# Altium schematic symbol library UCP.SchLib: 378 symbols (part 10 of 14)
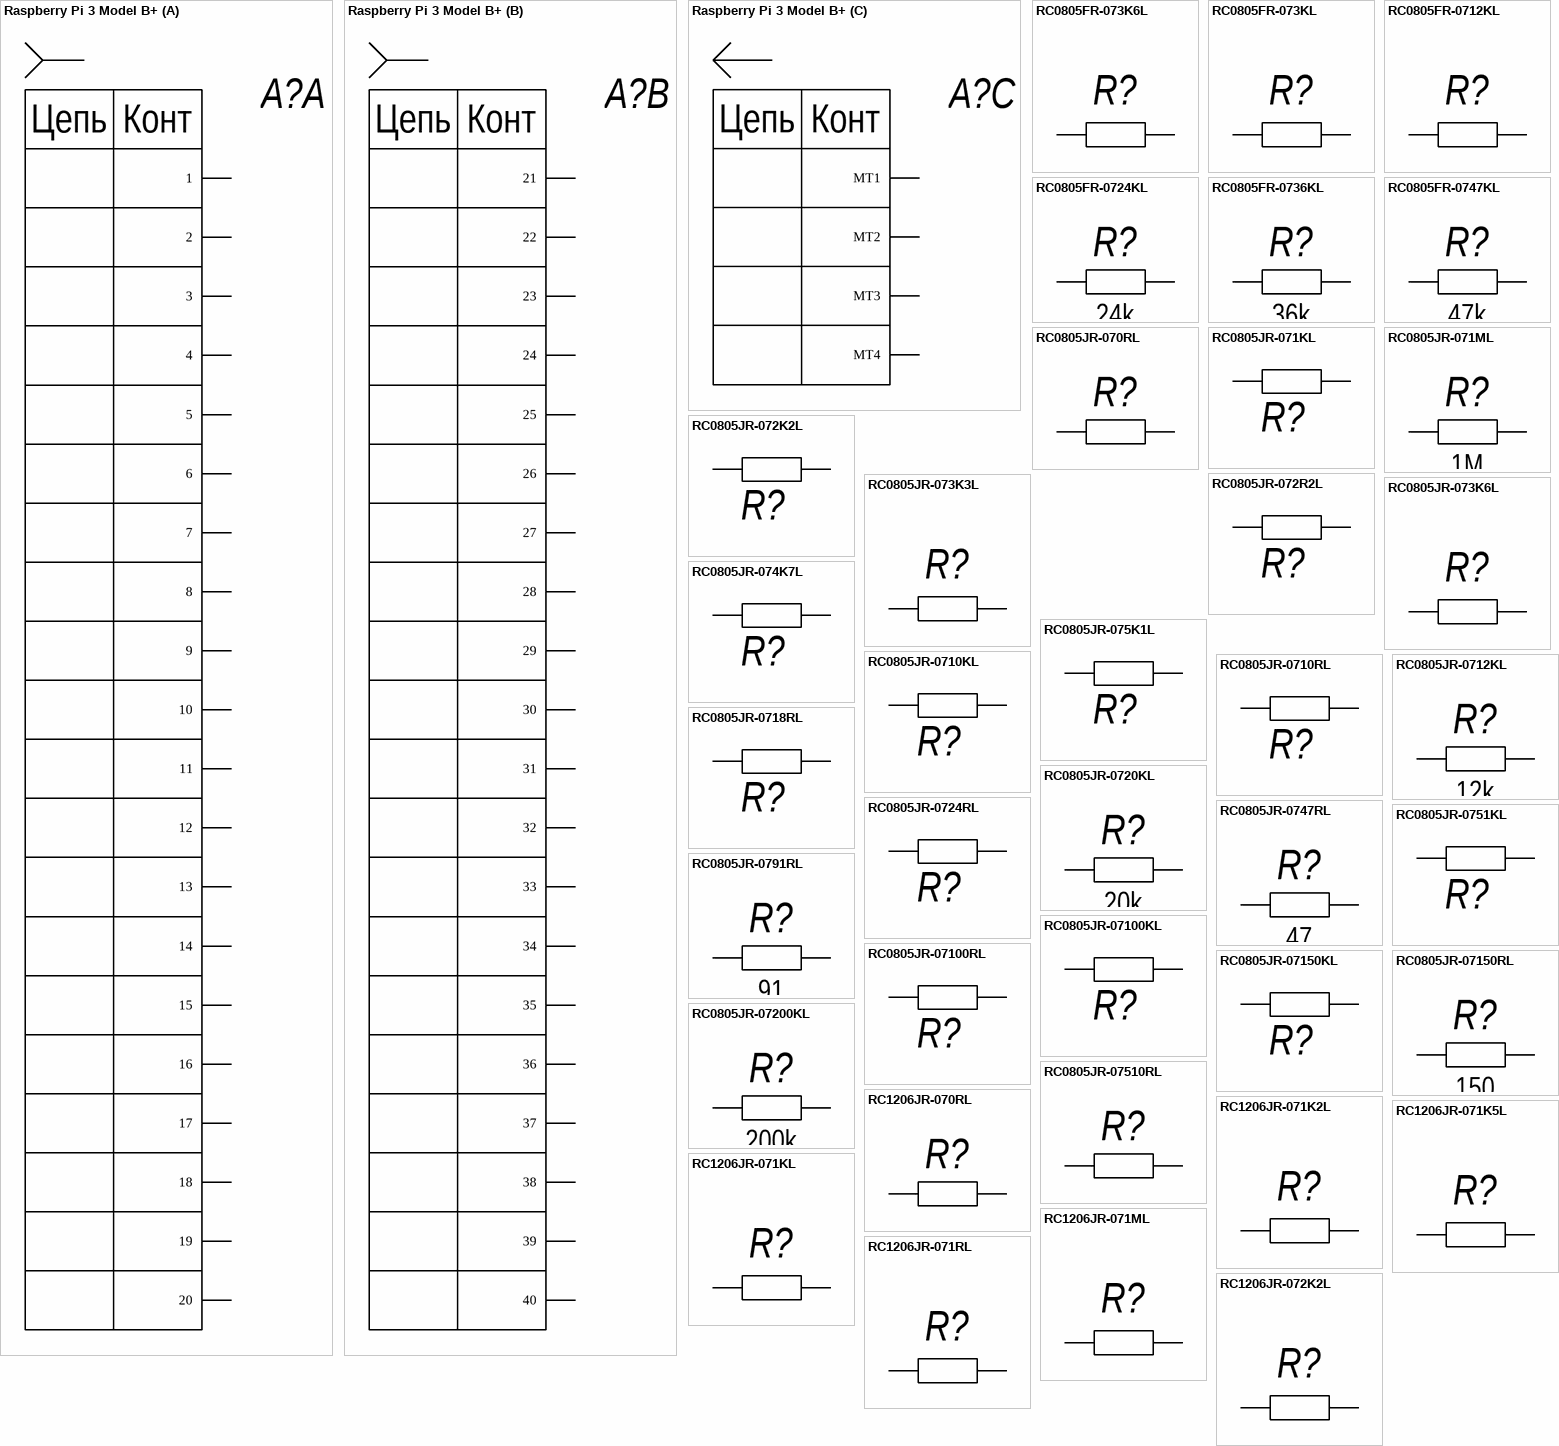
[diagram p33: symbols Raspberry Pi 3 Model B+ to RC1206JR-072K2L]

## RC1206JR-071K5L
designator R?  (value not drawn)
Chip Resistor Surface Mount 1206 1,5 кОм; Manufacturer 1: Yageo; Power Rating: 250mW; Tolerance: 5%; Resistance: 1.5kR; Voltage Rating: 200V; Temperature Coefficient: 100ppm/°C; Value: 1k5; Supplier 1: Digi-Key; Supplier Part Number 1: 311-1.5KERCT-ND; Manufacturer Part Number 1: RC1206JR-071K5L; RoHS: Yes; Category: Chip SMD Resistors; Stock 1: 19121; Pricing 1: 1=0,10000, 10=0,06300, 100=0,02580, 1000=0,01158, 2500=0,01005 (USD); Case/Package: 1206; Case Code (Imperial): 1206; Case Code (Metric): 3216; Size Code: 1206; Min Operating Temperature: -55°C; Max Operating Temperature: 155°C; Resistor Type: Thick Film; Packaging: Tape and Reel; Package Quantity: 1; Termination: SMD/SMT; Number of Terminations: 2; Max Power Dissipation: 250mW; Features: Moisture Resistant; Series: RC; Construction: Rectangular; Resistance Tolerance: 5%; Length: 3.1mm; Width: 1.6mm; Height: 0.026inch; Depth: 1.6mm; REACH SVHC: No SVHC; Military Standard: Not; Lead Free: Lead Free; RoHS Compliant: Yes; ComponentLink1URL: https://datasheet.ciiva.com/29181/402567-da-01-en-smd-widerstand-chip1206-1-5-kohm-29181470.pdf?src-supplier=Conrad; ComponentLink1Description: https://datasheet.ciiva.com/29181/402567-da-01-en-smd-widerstand-chip1206-1-5-kohm-29181470.pdf?src-supplier=Conrad; ComponentLink2URL: https://datasheet.ciiva.com/2458/pyu-r-int-thick-7-2458683.pdf?src-supplier=Digi-Key; ComponentLink2Description: https://datasheet.ciiva.com/2458/pyu-r-int-thick-7-2458683.pdf?src-supplier=Digi-Key; ComponentLink3URL: https://datasheet.ciiva.com/2458/pyu-r-int-thick-7-2458685.pdf?src-supplier=Digi-Key; ComponentLink3Description: https://datasheet.ciiva.com/2458/pyu-r-int-thick-7-2458685.pdf?src-supplier=Digi-Key; ComponentLink4URL: https://datasheet.ciiva.com/7857/444357-7857455.pdf?src-supplier=Element14; ComponentLink4Description: https://datasheet.ciiva.com/7857/444357-7857455.pdf?src-supplier=Element14; ComponentLink5URL: https://datasheet.ciiva.com/2458/pyu-r-int-thick-7-2458684.pdf?src-supplier=Digi-Key; ComponentLink5Description: https://datasheet.ciiva.com/2458/pyu-r-int-thick-7-2458684.pdf?src-supplier=Digi-Key; Mount: SMT; Type: Резистор
footprint RESC310X160X65L40N (Resistor, Chip; 3.10 mm L X 1.60 mm W X 0.65 mm H body)
pins: 1, 2

## RC1206JR-071KL
designator R?  (value not drawn)
Chip Resistor Surface Mount 1206 1 кОм; Manufacturer 1: Yageo; Resistance: 1kR; Power Rating: 250mW; Tolerance: 5%; Voltage Rating: 200V; Temperature Coefficient: 100ppm/°C; Value: 1k; Supplier 1: Digi-Key; Supplier Part Number 1: 311-1.0KERCT-ND; Manufacturer Part Number 1: RC1206JR-071KL; RoHS: Yes; Category: Chip SMD Resistors; Stock 1: 240419; Pricing 1: 1=0,10000, 10=0,06300, 100=0,02580, 1000=0,01158, 2500=0,01005 (USD); Case/Package: 1206; Case Code (Metric): 3216; Case Code (Imperial): 1206; Size Code: 1206; Min Operating Temperature: -55°C; Max Operating Temperature: 155°C; Package Quantity: 1; Packaging: Tape and Reel; Resistor Type: Thick Film; Number of Terminations: 2; Termination: SMD/SMT; Max Power Dissipation: 250mW; Series: RC1206; Resistance Tolerance: 5%; Construction: Rectangular; Length: 3.1mm; Width: 0.063inch; Height: 0.026inch; Depth: 1.6mm; REACH SVHC: Unknown; Military Standard: Not; Lead Free: Lead Free; RoHS Compliant: Yes; ComponentLink1URL: https://datasheet.ciiva.com/2458/pyu-r-int-thick-7-2458673.pdf?src-supplier=Digi-Key; ComponentLink1Description: https://datasheet.ciiva.com/2458/pyu-r-int-thick-7-2458673.pdf?src-supplier=Digi-Key; ComponentLink2URL: https://datasheet.ciiva.com/2458/pyu-r-int-thick-7-2458672.pdf?src-supplier=Digi-Key; ComponentLink2Description: https://datasheet.ciiva.com/2458/pyu-r-int-thick-7-2458672.pdf?src-supplier=Digi-Key; ComponentLink3URL: https://datasheet.ciiva.com/2458/pyu-r-int-thick-7-2458671.pdf?src-supplier=Digi-Key; ComponentLink3Description: https://datasheet.ciiva.com/2458/pyu-r-int-thick-7-2458671.pdf?src-supplier=Digi-Key; Mount: SMT; Type: Резистор
footprint RESC310X160X65L40N (Resistor, Chip; 3.10 mm L X 1.60 mm W X 0.65 mm H body)
pins: 1, 2

## RC1206JR-071ML
designator R?  (value not drawn)
Chip Resistor Surface Mount 1206 1 МОм; Manufacturer 1: Yageo; Tolerance: 5%; Resistance: 1MR; Power Rating: 250mW; Voltage Rating: 200V; Temperature Coefficient: 100ppm/°C; Value: 1M; Supplier 1: Digi-Key; Supplier Part Number 1: 311-1.0MERCT-ND; Manufacturer Part Number 1: RC1206JR-071ML; RoHS: Yes; Category: Chip SMD Resistors; Stock 1: 39096; Pricing 1: 1=0,10000, 10=0,06300, 100=0,02580, 1000=0,01158, 2500=0,01005 (USD); Case/Package: 1206; Case Code (Imperial): 1206; Case Code (Metric): 3216; Size Code: 1206; Min Operating Temperature: -55°C; Max Operating Temperature: 155°C; Packaging: Tape and Reel; Resistor Type: Thick Film; Termination: SMD/SMT; Features: Moisture Resistant; Series: RC; Max Power Dissipation: 250mW; Number of Terminations: 2; Resistance Tolerance: 5%; Construction: Rectangular; Length: 3.1mm; Depth: 1.6mm; REACH SVHC: Unknown; Military Standard: Not; Lead Free: Lead Free; RoHS Compliant: Yes; ComponentLink1URL: https://datasheet.ciiva.com/29181/402907-da-01-en-smd-widerstand-chip1206-1-mohm-29181423.pdf?src-supplier=Conrad; ComponentLink1Description: https://datasheet.ciiva.com/29181/402907-da-01-en-smd-widerstand-chip1206-1-mohm-29181423.pdf?src-supplier=Conrad; ComponentLink2URL: https://datasheet.ciiva.com/7857/444357-7857461.pdf?src-supplier=Element14; ComponentLink2Description: https://datasheet.ciiva.com/7857/444357-7857461.pdf?src-supplier=Element14; ComponentLink3URL: https://datasheet.ciiva.com/7857/444357-7857462.pdf?src-supplier=Element14; ComponentLink3Description: https://datasheet.ciiva.com/7857/444357-7857462.pdf?src-supplier=Element14; ComponentLink4URL: https://datasheet.ciiva.com/7983/444357-7983806.pdf?src-supplier=Element14; ComponentLink4Description: https://datasheet.ciiva.com/7983/444357-7983806.pdf?src-supplier=Element14; Mount: SMT; Type: Резистор
footprint RESC310X160X65L40N (Resistor, Chip; 3.10 mm L X 1.60 mm W X 0.65 mm H body)
pins: 1, 2

## RC1206JR-071RL
designator R?  (value not drawn)
Chip Resistor Surface Mount 1206 1 Ом; Manufacturer 1: Yageo; Resistance: 1R; Tolerance: 5%; Temperature Coefficient: 200ppm/°C; Power Rating: 250mW; Voltage Rating: 200V; Value: 1; Supplier 1: Digi-Key; Supplier Part Number 1: 311-1.0ERCT-ND; Manufacturer Part Number 1: RC1206JR-071RL; RoHS: Yes; Category: Chip SMD Resistors; Stock 1: 895943; Pricing 1: 1=0,13000, 10=0,11400, 100=0,04390, 1000=0,01930, 2500=0,01667 (USD); Case/Package: 1206; Contact Plating: Tin,Matte; Case Code (Metric): 3216; Case Code (Imperial): 1206; Size Code: 1206; Min Operating Temperature: -55°C; Max Operating Temperature: 155°C; Resistor Type: Thick Film; Packaging: Tape and Reel; Package Quantity: 5000; Number of Terminations: 2; Termination: SMD/SMT; Max Power Dissipation: 250mW; Voltage Rating (DC): 200V; Series: RC1206; Construction: Rectangular; Resistance Tolerance: 5%; Length: 0.122inch; Width: 0.063inch; Height: 0.026inch; Depth: 1.6mm; Radiation Hardening: No; REACH SVHC: No SVHC; Military Standard: Not; Lead Free: Lead Free; RoHS Compliant: Yes; ComponentLink1URL: https://datasheet.ciiva.com/2458/pyu-r-int-thick-7-2458887.pdf?src-supplier=Digi-Key; ComponentLink1Description: https://datasheet.ciiva.com/2458/pyu-r-int-thick-7-2458887.pdf?src-supplier=Digi-Key; ComponentLink2URL: https://datasheet.ciiva.com/2458/pyu-r-int-thick-7-2458888.pdf?src-supplier=Digi-Key; ComponentLink2Description: https://datasheet.ciiva.com/2458/pyu-r-int-thick-7-2458888.pdf?src-supplier=Digi-Key; ComponentLink3URL: https://datasheet.ciiva.com/2458/pyu-r-int-thick-7-2458889.pdf?src-supplier=Digi-Key; ComponentLink3Description: https://datasheet.ciiva.com/2458/pyu-r-int-thick-7-2458889.pdf?src-supplier=Digi-Key; ComponentLink4URL: https://datasheet.ciiva.com/17017/pyu-rc1206-51-rohs-l-4-17017071.pdf?src-supplier=Future+Electronics; ComponentLink4Description: https://datasheet.ciiva.com/17017/pyu-rc1206-51-rohs-l-4-17017071.pdf?src-supplier=Future+Electronics; Mount: SMT; Type: Резистор
footprint RESC310X160X65L40N (Resistor, Chip; 3.10 mm L X 1.60 mm W X 0.65 mm H body)
pins: 1, 2

## RC1206JR-072K2L
designator R?  (value not drawn)
Chip Resistor Surface Mount 1206 2,2кОм; Manufacturer 1: Yageo; Power Rating: 250mW; Tolerance: 5%; Resistance: 1.5kR; Voltage Rating: 200V; Temperature Coefficient: 100ppm/°C; Value: 2k2; Manufacturer Part Number 1: RC1206JR-072K2L; RoHS: Yes; Category: Chip SMD Resistors; Stock 1: 96360; Pricing 1: 1=0,10000, 10=0,06300, 100=0,02580, 1000=0,01158, 2500=0,01005 (USD); Case/Package: 1206; Case Code (Imperial): 1206; Case Code (Metric): 3216; Size Code: 1206; Min Operating Temperature: -55°C; Max Operating Temperature: 155°C; Resistor Type: Thick Film; Packaging: Tape and Reel; Package Quantity: 1; Termination: SMD/SMT; Number of Terminations: 2; Max Power Dissipation: 250mW; Features: Moisture Resistant; Series: RC; Construction: Rectangular; Resistance Tolerance: 5%; Length: 3.1mm; Width: 1.6mm; Height: 0.026inch; Depth: 1.6mm; REACH SVHC: No SVHC; Military Standard: Not; Lead Free: Lead Free; RoHS Compliant: Yes; ComponentLink1URL: https://datasheet.ciiva.com/29181/402567-da-01-en-smd-widerstand-chip1206-1-5-kohm-29181470.pdf?src-supplier=Conrad; ComponentLink1Description: https://datasheet.ciiva.com/29181/402567-da-01-en-smd-widerstand-chip1206-1-5-kohm-29181470.pdf?src-supplier=Conrad; ComponentLink2URL: https://datasheet.ciiva.com/2458/pyu-r-int-thick-7-2458683.pdf?src-supplier=Digi-Key; ComponentLink2Description: https://datasheet.ciiva.com/2458/pyu-r-int-thick-7-2458683.pdf?src-supplier=Digi-Key; ComponentLink3URL: https://datasheet.ciiva.com/2458/pyu-r-int-thick-7-2458685.pdf?src-supplier=Digi-Key; ComponentLink3Description: https://datasheet.ciiva.com/2458/pyu-r-int-thick-7-2458685.pdf?src-supplier=Digi-Key; ComponentLink4URL: https://datasheet.ciiva.com/7857/444357-7857455.pdf?src-supplier=Element14; ComponentLink4Description: https://datasheet.ciiva.com/7857/444357-7857455.pdf?src-supplier=Element14; ComponentLink5URL: https://datasheet.ciiva.com/2458/pyu-r-int-thick-7-2458684.pdf?src-supplier=Digi-Key; ComponentLink5Description: https://datasheet.ciiva.com/2458/pyu-r-int-thick-7-2458684.pdf?src-supplier=Digi-Key; Supplier 1: Digi-Key; Weight: 0.000571oz; ComponentLink6URL: https://datasheet.ciiva.com/2458/pyu-rc1206-51-rohs-l-4-2458688.pdf?src-supplier=Digi-Key; ComponentLink6Description: https://datasheet.ciiva.com/2458/pyu-rc1206-51-rohs-l-4-2458688.pdf?src-supplier=Digi-Key; ComponentLink7URL: https://datasheet.ciiva.com/29181/402583-da-01-en-smd-widerstand-chip1206-2-2-kohm-29181472.pdf?src-supplier=Conrad; ComponentLink7Description: https://datasheet.ciiva.com/29181/402583-da-01-en-smd-widerstand-chip1206-2-2-kohm-29181472.pdf?src-supplier=Conrad; ComponentLink8URL: https://datasheet.ciiva.com/7857/444357-7857479.pdf?src-supplier=Element14; ComponentLink8Description: https://datasheet.ciiva.com/7857/444357-7857479.pdf?src-supplier=Element14; ComponentLink9URL: https://datasheet.ciiva.com/7857/444357-7857480.pdf?src-supplier=Element14; ComponentLink9Description: https://datasheet.ciiva.com/7857/444357-7857480.pdf?src-supplier=Element14; ComponentLink10URL: https://datasheet.ciiva.com/16963/pyu-rc1206-51-rohs-l-4-16963561.pdf?src-supplier=Future+Electronics; ComponentLink10Description: https://datasheet.ciiva.com/16963/pyu-rc1206-51-rohs-l-4-16963561.pdf?src-supplier=Future+Electronics; Supplier Part Number 1: 311-2.2KERCT-ND; Mount: SMT; Type: Резистор
footprint RESC310X160X65L40N (Resistor, Chip; 3.10 mm L X 1.60 mm W X 0.65 mm H body)
pins: 1, 2

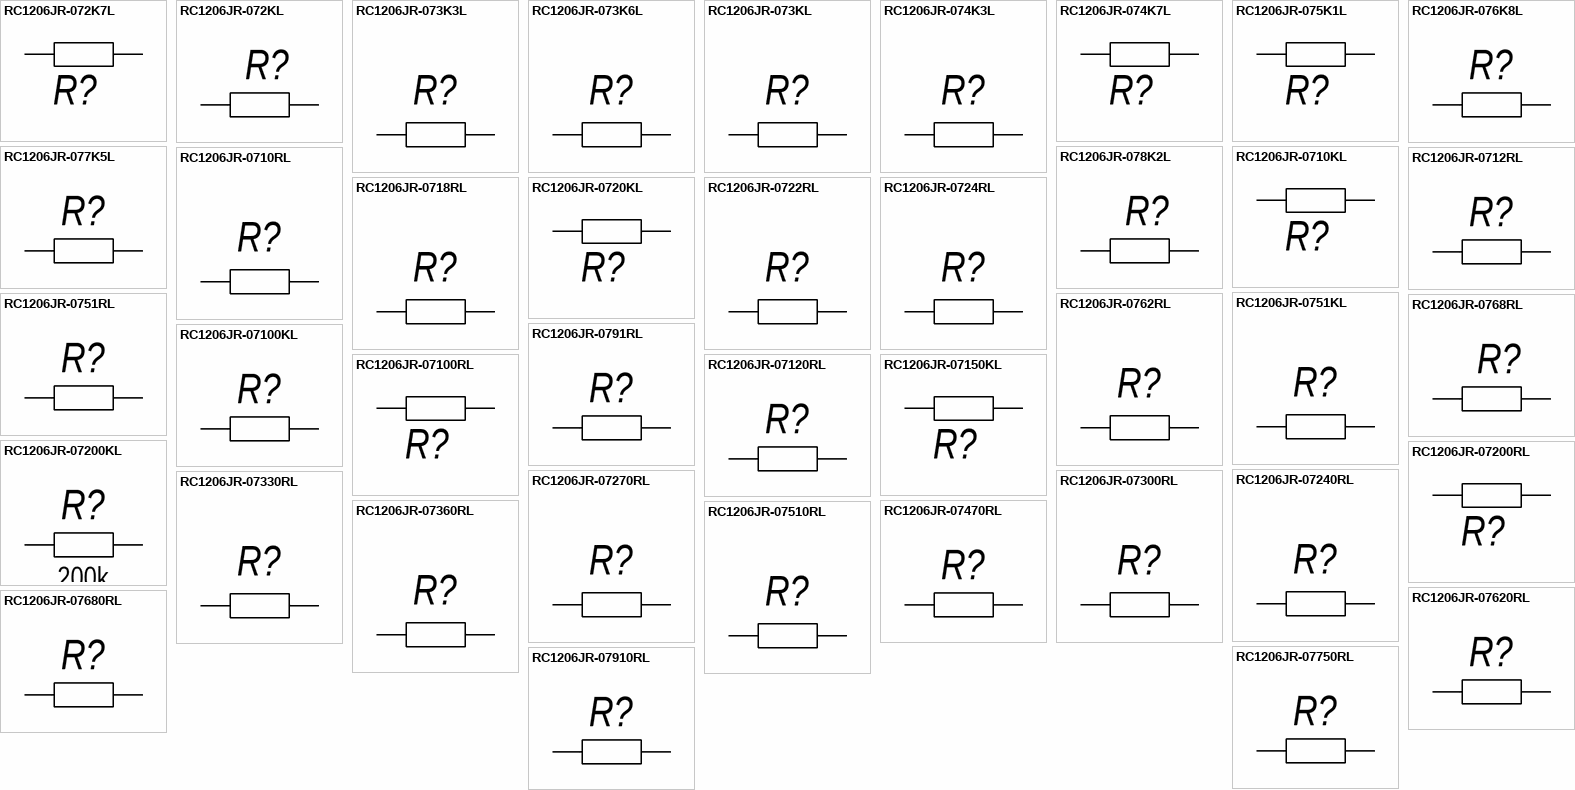
[diagram p19: symbols RC1206JR-072K7L to RC1206JR-07910RL]

## RC1206JR-072K7L
designator R?  (value not drawn)
Chip Resistor Surface Mount 1206 2,7 кОм; Resistance: 4.7kR; Tolerance: 5%; Power Rating: 250mW; Voltage Rating: 200V; Temperature Coefficient: 100ppm/°C; Value: 2k7; Supplier 1: Digi-Key; Supplier Part Number 1: 311-4.7KERCT-ND; Supplier 2: RSComponents; Manufacturer 2: Yageo; Manufacturer Part Number 2: RC1206JR-074K7L; RoHS: Yes; Category: Chip SMD Resistors; Stock 2: 1300; Pricing 2: 5000=0,00600 (GBP); Case/Package: 1206; Case Code (Metric): 3216; Case Code (Imperial): 1206; Size Code: 1206; Min Operating Temperature: -55°C; Max Operating Temperature: 155°C; Resistor Type: Thick Film; Packaging: Tape and Reel; Package Quantity: 1; Number of Terminations: 2; Termination: SMD/SMT; Max Power Dissipation: 250mW; Features: Moisture Resistant; Series: RC; Resistance Tolerance: 5%; Construction: Rectangular; Length: 3.1mm; Width: 0.063inch; Height: 0.026inch; Depth: 1.6mm; REACH SVHC: Unknown; Military Standard: Not; Lead Free: Lead Free; RoHS Compliant: Yes; ComponentLink1URL: https://datasheet.ciiva.com/29181/402621-da-01-en-smd-widerstand-chip1206-4-7-kohm-29181481.pdf?src-supplier=Conrad; ComponentLink1Description: https://datasheet.ciiva.com/29181/402621-da-01-en-smd-widerstand-chip1206-4-7-kohm-29181481.pdf?src-supplier=Conrad; ComponentLink2URL: https://datasheet.ciiva.com/2458/pyu-r-int-thick-7-2458640.pdf?src-supplier=Digi-Key; ComponentLink2Description: https://datasheet.ciiva.com/2458/pyu-r-int-thick-7-2458640.pdf?src-supplier=Digi-Key; ComponentLink3URL: https://datasheet.ciiva.com/7857/444357-7857511.pdf?src-supplier=Element14; ComponentLink3Description: https://datasheet.ciiva.com/7857/444357-7857511.pdf?src-supplier=Element14; ComponentLink4URL: https://datasheet.ciiva.com/7857/444357-7857512.pdf?src-supplier=Element14; ComponentLink4Description: https://datasheet.ciiva.com/7857/444357-7857512.pdf?src-supplier=Element14; ComponentLink5URL: https://datasheet.ciiva.com/16850/pyu-rc1206-51-rohs-l-4-16850376.pdf?src-supplier=Future+Electronics; ComponentLink5Description: https://datasheet.ciiva.com/16850/pyu-rc1206-51-rohs-l-4-16850376.pdf?src-supplier=Future+Electronics; ComponentLink6URL: https://datasheet.ciiva.com/2458/pyu-r-int-thick-7-2458638.pdf?src-supplier=Digi-Key; ComponentLink6Description: https://datasheet.ciiva.com/2458/pyu-r-int-thick-7-2458638.pdf?src-supplier=Digi-Key; ComponentLink7URL: https://datasheet.ciiva.com/2458/pyu-r-int-thick-7-2458639.pdf?src-supplier=Digi-Key; ComponentLink7Description: https://datasheet.ciiva.com/2458/pyu-r-int-thick-7-2458639.pdf?src-supplier=Digi-Key; Supplier Part Number 2: 1988481; Mount: SMT; Type: Резистор
footprint RESC310X160X65L40N (Resistor, Chip; 3.10 mm L X 1.60 mm W X 0.65 mm H body)
pins: 1, 2

## RC1206JR-072KL
designator R?  (value not drawn)
Chip Resistor Surface Mount 1206 2 кОм; Manufacturer 1: Yageo; Resistance: 2kR; Tolerance: 5%; Temperature Coefficient: 100ppm/°C; Power Rating: 250mW; Voltage Rating: 200V; Value: 2k; Supplier 1: Digi-Key; Manufacturer Part Number 1: RC1206JR-072KL; RoHS: Yes; Category: Chip SMD Resistors; Stock 1: 71; Pricing 1: 1=0,10000, 10=0,06300, 100=0,02580, 1000=0,01158, 2500=0,01005 (USD); Case/Package: 1206; Contact Plating: Tin,Matte; Case Code (Imperial): 1206; Case Code (Metric): 3216; Min Operating Temperature: -55°C; Max Operating Temperature: 155°C; Resistor Type: Thick Film; Packaging: Tape and Reel; Termination: SMD/SMT; Voltage Rating (DC): 200V; Working Voltage: 200V; Number of Terminations: 2; Features: Moisture Resistant; Series: RC; Max Power Dissipation: 250mW; Construction: Rectangular; Technology: THICK FILM; Length: 3.1mm; Depth: 1.6mm; Radiation Hardening: No; Military Standard: Not; Lead Free: Lead Free; RoHS Compliant: Yes; ComponentLink1URL: https://datasheet.ciiva.com/16741/pyu-rc1206-51-rohs-l-4-16741159.pdf?src-supplier=Future+Electronics; ComponentLink1Description: https://datasheet.ciiva.com/16741/pyu-rc1206-51-rohs-l-4-16741159.pdf?src-supplier=Future+Electronics; Supplier Part Number 1: 311-2.0KERCT-ND; Mount: SMT; Type: Резистор
footprint RESC310X160X65L40N (Resistor, Chip; 3.10 mm L X 1.60 mm W X 0.65 mm H body)
pins: 1, 2

## RC1206JR-073K3L
designator R?  (value not drawn)
Chip Resistor Surface Mount 1206 3,3 кОм; Manufacturer 1: Yageo; Description 1: Res Thick Film 1206 3.3K Ohm 5% 0.25W(1/4W) ±100ppm/°C Pad SMD T/R; Resistance: 3.3kR; Tolerance: 5%; Power Rating: 250mW; Voltage Rating: 200V; Temperature Coefficient: 100ppm/°C; Value: 3k3; Supplier 1: Digi-Key; Supplier Part Number 1: 311-3.3KERCT-ND; Manufacturer Part Number 1: RC1206JR-073K3L; RoHS: Yes; Category: Chip SMD Resistors; Stock 1: 342635; Pricing 1: 1=0,10000, 10=0,06300, 100=0,02580, 1000=0,01158, 2500=0,01005 (USD); Case/Package: 1206; Case Code (Imperial): 1206; Case Code (Metric): 3216; Min Operating Temperature: -55°C; Max Operating Temperature: 155°C; Resistor Type: Thick Film; Package Quantity: 1; Packaging: Tape and Reel; Termination: SMD/SMT; Number of Terminations: 2; Max Power Dissipation: 250mW; Working Voltage: 200V; Features: Moisture Resistant; Series: RC; Resistance Tolerance: 5%; Technology: THICK FILM; Construction: Rectangular; Length: 0.122inch; Width: 0.063inch; Height: 0.026inch; Depth: 1.6mm; RoHS Compliant: Yes; REACH SVHC: Unknown; Military Standard: Not; Lead Free: Lead Free; ComponentLink1URL: https://datasheet.ciiva.com/29181/402605-da-01-en-smd-widerstand-chip1206-3-3-kohm-29181477.pdf?src-supplier=Conrad; ComponentLink1Description: https://datasheet.ciiva.com/29181/402605-da-01-en-smd-widerstand-chip1206-3-3-kohm-29181477.pdf?src-supplier=Conrad; ComponentLink2URL: https://datasheet.ciiva.com/2458/pyu-r-int-thick-7-2458662.pdf?src-supplier=Digi-Key; ComponentLink2Description: https://datasheet.ciiva.com/2458/pyu-r-int-thick-7-2458662.pdf?src-supplier=Digi-Key; ComponentLink3URL: https://datasheet.ciiva.com/2458/pyu-r-int-thick-7-2458663.pdf?src-supplier=Digi-Key; ComponentLink3Description: https://datasheet.ciiva.com/2458/pyu-r-int-thick-7-2458663.pdf?src-supplier=Digi-Key; ComponentLink4URL: https://datasheet.ciiva.com/2458/pyu-r-int-thick-7-2458664.pdf?src-supplier=Digi-Key; ComponentLink4Description: https://datasheet.ciiva.com/2458/pyu-r-int-thick-7-2458664.pdf?src-supplier=Digi-Key; ComponentLink5URL: https://datasheet.ciiva.com/7857/444357-7857499.pdf?src-supplier=Element14; ComponentLink5Description: https://datasheet.ciiva.com/7857/444357-7857499.pdf?src-supplier=Element14; ComponentLink6URL: https://datasheet.ciiva.com/7857/444357-7857500.pdf?src-supplier=Element14; ComponentLink6Description: https://datasheet.ciiva.com/7857/444357-7857500.pdf?src-supplier=Element14; Mount: SMT; Type: Резистор
footprint RESC310X160X65L40N (Resistor, Chip; 3.10 mm L X 1.60 mm W X 0.65 mm H body)
pins: 1, 2

## RC1206JR-073K6L
designator R?  (value not drawn)
Chip Resistor Surface Mount 1206 3,6 кОм; Manufacturer 1: Yageo; Manufacturer Part Number 1: RC1206JR-074K3L; Resistance: 4.3kR; Tolerance: 5%; Power Rating: 250mW; Voltage Rating: 200V; Temperature Coefficient: 100ppm/°C; Value: 3k6; Supplier 1: Digi-Key; Supplier Part Number 1: 311-4.3KERCT-ND; RoHS: Yes; Category: Chip SMD Resistors; Stock 1: 11341; Pricing 1: 1=0,10000, 10=0,06300, 100=0,02580, 1000=0,01158, 2500=0,01005 (USD); Case/Package: 1206; Case Code (Imperial): 1206; Case Code (Metric): 3216; Size Code: 1206; Min Operating Temperature: -55°C; Max Operating Temperature: 155°C; Packaging: Tape and Reel; Termination: SMD/SMT; Resistor Type: Thick Film; Voltage Rating (DC): 200V; Features: Moisture Resistant; Series: RC; Max Power Dissipation: 250mW; Number of Terminations: 2; Construction: Rectangular; Length: 3.1mm; Depth: 1.6mm; Military Standard: Not; Lead Free: Lead Free; RoHS Compliant: Yes; ComponentLink1URL: http://www.mouser.com/ds/2/447/PYu-RC1206_51_RoHS_L-4-349080.pdf?src-supplier=Mouser; ComponentLink1Description: http://www.mouser.com/ds/2/447/PYu-RC1206_51_RoHS_L-4-349080.pdf?src-supplier=Mouser; ComponentLink2URL: http://components.arrow.com/part/dataview/0323_03544991?src-supplier=Arrow+Europe; ComponentLink2Description: http://components.arrow.com/part/dataview/0323_03544991?src-supplier=Arrow+Europe; ComponentLink3URL: http://www.yageo.com/documents/recent/PYu-RC1206_51_RoHS_L_4.pdf?src-supplier=Future+Electronics; ComponentLink3Description: http://www.yageo.com/documents/recent/PYu-RC1206_51_RoHS_L_4.pdf?src-supplier=Future+Electronics; ComponentLink4URL: http://www.yageo.com.tw/exep/pages/download/literatures/PYu-R_INT-thick_7.pdf?src-supplier=Digi-Key; ComponentLink4Description: http://www.yageo.com.tw/exep/pages/download/literatures/PYu-R_INT-thick_7.pdf?src-supplier=Digi-Key; ComponentLink5URL: http://www.yageo.com/documents/recent/PYu-RC_Group_51_RoHS_L_10.pdf?src-supplier=Digi-Key; ComponentLink5Description: http://www.yageo.com/documents/recent/PYu-RC_Group_51_RoHS_L_10.pdf?src-supplier=Digi-Key; Mount: SMT; Type: Резистор
footprint RESC310X160X65L40N (Resistor, Chip; 3.10 mm L X 1.60 mm W X 0.65 mm H body)
pins: 1, 2

## RC1206JR-073KL
designator R?  (value not drawn)
Chip Resistor Surface Mount 1206 3 кОм; Manufacturer 1: Yageo; Manufacturer Part Number 1: RC1206JR-071KL; Resistance: 1kR; Power Rating: 250mW; Tolerance: 5%; Voltage Rating: 200V; Temperature Coefficient: 100ppm/°C; Value: 3k; Supplier 1: Digi-Key; Supplier Part Number 1: 311-1.0KERCT-ND; RoHS: Yes; Category: Chip SMD Resistors; Stock 1: 240419; Pricing 1: 1=0,10000, 10=0,06300, 100=0,02580, 1000=0,01158, 2500=0,01005 (USD); Case/Package: 1206; Case Code (Metric): 3216; Case Code (Imperial): 1206; Size Code: 1206; Min Operating Temperature: -55°C; Max Operating Temperature: 155°C; Package Quantity: 1; Packaging: Tape and Reel; Resistor Type: Thick Film; Number of Terminations: 2; Termination: SMD/SMT; Max Power Dissipation: 250mW; Series: RC1206; Resistance Tolerance: 5%; Construction: Rectangular; Length: 3.1mm; Width: 0.063inch; Height: 0.026inch; Depth: 1.6mm; REACH SVHC: Unknown; Military Standard: Not; Lead Free: Lead Free; RoHS Compliant: Yes; ComponentLink1URL: https://datasheet.ciiva.com/2458/pyu-r-int-thick-7-2458673.pdf?src-supplier=Digi-Key; ComponentLink1Description: https://datasheet.ciiva.com/2458/pyu-r-int-thick-7-2458673.pdf?src-supplier=Digi-Key; ComponentLink2URL: https://datasheet.ciiva.com/2458/pyu-r-int-thick-7-2458672.pdf?src-supplier=Digi-Key; ComponentLink2Description: https://datasheet.ciiva.com/2458/pyu-r-int-thick-7-2458672.pdf?src-supplier=Digi-Key; ComponentLink3URL: https://datasheet.ciiva.com/2458/pyu-r-int-thick-7-2458671.pdf?src-supplier=Digi-Key; ComponentLink3Description: https://datasheet.ciiva.com/2458/pyu-r-int-thick-7-2458671.pdf?src-supplier=Digi-Key; Supplier 2: Digi-Key; Supplier Part Number 2: 311-3.0KERCT-ND; Mount: SMT; Type: Резистор
footprint RESC310X160X65L40N (Resistor, Chip; 3.10 mm L X 1.60 mm W X 0.65 mm H body)
pins: 1, 2

## RC1206JR-074K3L
designator R?  (value not drawn)
Chip Resistor Surface Mount 1206 4,3 кОм; Manufacturer 1: Yageo; Resistance: 4.3kR; Tolerance: 5%; Power Rating: 250mW; Voltage Rating: 200V; Temperature Coefficient: 100ppm/°C; Value: 4k3; Supplier 1: Digi-Key; Supplier Part Number 1: 311-4.3KERCT-ND; Manufacturer Part Number 1: RC1206JR-074K3L; RoHS: Yes; Category: Chip SMD Resistors; Stock 1: 11341; Pricing 1: 1=0,10000, 10=0,06300, 100=0,02580, 1000=0,01158, 2500=0,01005 (USD); Case/Package: 1206; Case Code (Imperial): 1206; Case Code (Metric): 3216; Size Code: 1206; Min Operating Temperature: -55°C; Max Operating Temperature: 155°C; Packaging: Tape and Reel; Termination: SMD/SMT; Resistor Type: Thick Film; Voltage Rating (DC): 200V; Features: Moisture Resistant; Series: RC; Max Power Dissipation: 250mW; Number of Terminations: 2; Construction: Rectangular; Length: 3.1mm; Depth: 1.6mm; Military Standard: Not; Lead Free: Lead Free; RoHS Compliant: Yes; ComponentLink1URL: http://www.mouser.com/ds/2/447/PYu-RC1206_51_RoHS_L-4-349080.pdf?src-supplier=Mouser; ComponentLink1Description: http://www.mouser.com/ds/2/447/PYu-RC1206_51_RoHS_L-4-349080.pdf?src-supplier=Mouser; ComponentLink2URL: http://components.arrow.com/part/dataview/0323_03544991?src-supplier=Arrow+Europe; ComponentLink2Description: http://components.arrow.com/part/dataview/0323_03544991?src-supplier=Arrow+Europe; ComponentLink3URL: http://www.yageo.com/documents/recent/PYu-RC1206_51_RoHS_L_4.pdf?src-supplier=Future+Electronics; ComponentLink3Description: http://www.yageo.com/documents/recent/PYu-RC1206_51_RoHS_L_4.pdf?src-supplier=Future+Electronics; ComponentLink4URL: http://www.yageo.com.tw/exep/pages/download/literatures/PYu-R_INT-thick_7.pdf?src-supplier=Digi-Key; ComponentLink4Description: http://www.yageo.com.tw/exep/pages/download/literatures/PYu-R_INT-thick_7.pdf?src-supplier=Digi-Key; ComponentLink5URL: http://www.yageo.com/documents/recent/PYu-RC_Group_51_RoHS_L_10.pdf?src-supplier=Digi-Key; ComponentLink5Description: http://www.yageo.com/documents/recent/PYu-RC_Group_51_RoHS_L_10.pdf?src-supplier=Digi-Key; Mount: SMT; Type: Резистор
footprint RESC310X160X65L40N (Resistor, Chip; 3.10 mm L X 1.60 mm W X 0.65 mm H body)
pins: 1, 2

## RC1206JR-074K7L
designator R?  (value not drawn)
Chip Resistor Surface Mount 1206 4,7 кОм; Resistance: 4.7kR; Tolerance: 5%; Power Rating: 250mW; Voltage Rating: 200V; Temperature Coefficient: 100ppm/°C; Value: 4k7; Supplier 1: Digi-Key; Supplier Part Number 1: 311-4.7KERCT-ND; Supplier 2: RSComponents; Manufacturer 2: Yageo; Manufacturer Part Number 2: RC1206JR-074K7L; RoHS: Yes; Category: Chip SMD Resistors; Stock 2: 1300; Pricing 2: 5000=0,00600 (GBP); Case/Package: 1206; Case Code (Metric): 3216; Case Code (Imperial): 1206; Size Code: 1206; Min Operating Temperature: -55°C; Max Operating Temperature: 155°C; Resistor Type: Thick Film; Packaging: Tape and Reel; Package Quantity: 1; Number of Terminations: 2; Termination: SMD/SMT; Max Power Dissipation: 250mW; Features: Moisture Resistant; Series: RC; Resistance Tolerance: 5%; Construction: Rectangular; Length: 3.1mm; Width: 0.063inch; Height: 0.026inch; Depth: 1.6mm; REACH SVHC: Unknown; Military Standard: Not; Lead Free: Lead Free; RoHS Compliant: Yes; ComponentLink1URL: https://datasheet.ciiva.com/29181/402621-da-01-en-smd-widerstand-chip1206-4-7-kohm-29181481.pdf?src-supplier=Conrad; ComponentLink1Description: https://datasheet.ciiva.com/29181/402621-da-01-en-smd-widerstand-chip1206-4-7-kohm-29181481.pdf?src-supplier=Conrad; ComponentLink2URL: https://datasheet.ciiva.com/2458/pyu-r-int-thick-7-2458640.pdf?src-supplier=Digi-Key; ComponentLink2Description: https://datasheet.ciiva.com/2458/pyu-r-int-thick-7-2458640.pdf?src-supplier=Digi-Key; ComponentLink3URL: https://datasheet.ciiva.com/7857/444357-7857511.pdf?src-supplier=Element14; ComponentLink3Description: https://datasheet.ciiva.com/7857/444357-7857511.pdf?src-supplier=Element14; ComponentLink4URL: https://datasheet.ciiva.com/7857/444357-7857512.pdf?src-supplier=Element14; ComponentLink4Description: https://datasheet.ciiva.com/7857/444357-7857512.pdf?src-supplier=Element14; ComponentLink5URL: https://datasheet.ciiva.com/16850/pyu-rc1206-51-rohs-l-4-16850376.pdf?src-supplier=Future+Electronics; ComponentLink5Description: https://datasheet.ciiva.com/16850/pyu-rc1206-51-rohs-l-4-16850376.pdf?src-supplier=Future+Electronics; ComponentLink6URL: https://datasheet.ciiva.com/2458/pyu-r-int-thick-7-2458638.pdf?src-supplier=Digi-Key; ComponentLink6Description: https://datasheet.ciiva.com/2458/pyu-r-int-thick-7-2458638.pdf?src-supplier=Digi-Key; ComponentLink7URL: https://datasheet.ciiva.com/2458/pyu-r-int-thick-7-2458639.pdf?src-supplier=Digi-Key; ComponentLink7Description: https://datasheet.ciiva.com/2458/pyu-r-int-thick-7-2458639.pdf?src-supplier=Digi-Key; Supplier Part Number 2: 1988481; Mount: SMT; Type: Резистор
footprint RESC310X160X65L40N (Resistor, Chip; 3.10 mm L X 1.60 mm W X 0.65 mm H body)
pins: 1, 2

## RC1206JR-075K1L
designator R?  (value not drawn)
Chip Resistor Surface Mount 1206 5,1 кОм; Manufacturer 1: Yageo; Description 1: Res Thick Film 1206 5.1K Ohm 5% 1/4W ±100ppm/°C Molded SMD SMD Paper T/R; Resistance: 5.1kR; Tolerance: 5%; Temperature Coefficient: 100ppm/°C; Power Rating: 250mW; Voltage Rating: 200V; Value: 5k1; Supplier 1: Digi-Key; Supplier Part Number 1: 311-5.1KERCT-ND; Manufacturer Part Number 1: RC1206JR-075K1L; RoHS: Yes; Category: Chip SMD Resistors; Stock 1: 180000; Pricing 1: 1=0,10000, 10=0,06300, 100=0,02580, 1000=0,01158, 2500=0,01005 (USD); Case/Package: 1206; Contact Plating: Tin,Matte; Case Code (Imperial): 1206; Case Code (Metric): 3216; Min Operating Temperature: -55°C; Max Operating Temperature: 155°C; Resistor Type: Thick Film; Packaging: Tape and Reel; Package Quantity: 1; Termination: SMD/SMT; Number of Terminations: 2; Max Power Dissipation: 250mW; Voltage Rating (DC): 200V; Working Voltage: 200V; Features: Moisture Resistant; Series: RC; Construction: Rectangular; Technology: THICK FILM; Length: 3.1mm; Width: 1.6mm; Height: 0.026inch; Depth: 1.6mm; Radiation Hardening: No; Military Standard: Not; Lead Free: Lead Free; RoHS Compliant: Yes; ComponentLink1URL: https://datasheet.ciiva.com/2458/pyu-r-int-thick-7-2458950.pdf?src-supplier=Digi-Key; ComponentLink1Description: https://datasheet.ciiva.com/2458/pyu-r-int-thick-7-2458950.pdf?src-supplier=Digi-Key; ComponentLink2URL: https://datasheet.ciiva.com/2458/pyu-r-int-thick-7-2458951.pdf?src-supplier=Digi-Key; ComponentLink2Description: https://datasheet.ciiva.com/2458/pyu-r-int-thick-7-2458951.pdf?src-supplier=Digi-Key; ComponentLink3URL: https://datasheet.ciiva.com/2458/pyu-r-int-thick-7-2458952.pdf?src-supplier=Digi-Key; ComponentLink3Description: https://datasheet.ciiva.com/2458/pyu-r-int-thick-7-2458952.pdf?src-supplier=Digi-Key; ComponentLink4URL: https://datasheet.ciiva.com/16741/pyu-rc1206-51-rohs-l-4-16741707.pdf?src-supplier=Future+Electronics; ComponentLink4Description: https://datasheet.ciiva.com/16741/pyu-rc1206-51-rohs-l-4-16741707.pdf?src-supplier=Future+Electronics; Mount: SMT; Type: Резистор
footprint RESC310X160X65L40N (Resistor, Chip; 3.10 mm L X 1.60 mm W X 0.65 mm H body)
pins: 1, 2

## RC1206JR-076K8L
designator R?  (value not drawn)
Chip Resistor Surface Mount 1206 6,8 кОм; Manufacturer 1: Yageo; Resistance: 7.5kR; Power Rating: 250mW; Tolerance: 5%; Voltage Rating: 200V; Temperature Coefficient: 100ppm/°C; Value: 6k8; Manufacturer Part Number 1: RC1206JR-076K8L; RoHS: Yes; Category: Chip SMD Resistors; Stock 1: 1370; Pricing 1: 10=0,0378, 100=0,0162, 500=0,0117, 1000=0,0072, 2500=0,0071, 5000=0,0069, 25000=0,0068, 50000=0,0066 (EUR); Case/Package: 1206; Case Code (Metric): 3216; Case Code (Imperial): 1206; Min Operating Temperature: -55°C; Max Operating Temperature: 155°C; Package Quantity: 1; Packaging: Tape and Reel; Resistor Type: Thick Film; Number of Terminations: 2; Termination: SMD/SMT; Max Power Dissipation: 250mW; Voltage Rating (DC): 200V; Working Voltage: 200V; Features: Moisture Resistant; Series: RC; Technology: THICK FILM; Construction: Rectangular; Length: 3.1mm; Width: 0.063inch; Height: 0.026inch; Depth: 1.6mm; Military Standard: Not; Lead Free: Lead Free; RoHS Compliant: Yes; ComponentLink1URL: https://datasheet.ciiva.com/2458/pyu-r-int-thick-7-2458768.pdf?src-supplier=Digi-Key; ComponentLink1Description: https://datasheet.ciiva.com/2458/pyu-r-int-thick-7-2458768.pdf?src-supplier=Digi-Key; ComponentLink2URL: https://datasheet.ciiva.com/2458/pyu-r-int-thick-7-2458769.pdf?src-supplier=Digi-Key; ComponentLink2Description: https://datasheet.ciiva.com/2458/pyu-r-int-thick-7-2458769.pdf?src-supplier=Digi-Key; ComponentLink3URL: https://datasheet.ciiva.com/2458/pyu-r-int-thick-7-2458767.pdf?src-supplier=Digi-Key; ComponentLink3Description: https://datasheet.ciiva.com/2458/pyu-r-int-thick-7-2458767.pdf?src-supplier=Digi-Key; Mount: SMT; Type: Резистор; Supplier 1: Farnell; Supplier Part Number 1: 9240624; RoHS 1: Yes; Size Code: 1206; Resistance Tolerance: 5%; Reach SVHC Compliant: Unknown; ComponentLink4URL: https://datasheet.ciiva.com/7857/444357-7857531.pdf?src-supplier=Element14; ComponentLink4Description: https://datasheet.ciiva.com/7857/444357-7857531.pdf?src-supplier=Element14; ComponentLink5URL: https://datasheet.ciiva.com/7857/444357-7857532.pdf?src-supplier=Element14; ComponentLink5Description: https://datasheet.ciiva.com/7857/444357-7857532.pdf?src-supplier=Element14; ComponentLink6URL: https://datasheet.ciiva.com/17054/pyu-rc1206-51-rohs-l-4-17054060.pdf?src-supplier=Future+Electronics; ComponentLink6Description: https://datasheet.ciiva.com/17054/pyu-rc1206-51-rohs-l-4-17054060.pdf?src-supplier=Future+Electronics
footprint RESC310X160X65L40N (Resistor, Chip; 3.10 mm L X 1.60 mm W X 0.65 mm H body)
pins: 1, 2

## RC1206JR-077K5L
designator R?  (value not drawn)
Chip Resistor Surface Mount 1206 7,5 кОм; Manufacturer 1: Yageo; Resistance: 7.5kR; Power Rating: 250mW; Tolerance: 5%; Voltage Rating: 200V; Temperature Coefficient: 100ppm/°C; Value: 7k5; Supplier 1: Digi-Key; Supplier Part Number 1: 311-7.5KERCT-ND; Manufacturer Part Number 1: RC1206JR-077K5L; RoHS: Yes; Category: Chip SMD Resistors; Stock 1: 10010; Pricing 1: 1=0,10000, 10=0,06300, 100=0,02580, 1000=0,01158, 2500=0,01005 (USD); Case/Package: 1206; Case Code (Metric): 3216; Case Code (Imperial): 1206; Min Operating Temperature: -55°C; Max Operating Temperature: 155°C; Package Quantity: 1; Packaging: Tape and Reel; Resistor Type: Thick Film; Number of Terminations: 2; Termination: SMD/SMT; Max Power Dissipation: 250mW; Voltage Rating (DC): 200V; Working Voltage: 200V; Features: Moisture Resistant; Series: RC; Technology: THICK FILM; Construction: Rectangular; Length: 3.1mm; Width: 0.063inch; Height: 0.026inch; Depth: 1.6mm; Military Standard: Not; Lead Free: Lead Free; RoHS Compliant: Yes; ComponentLink1URL: https://datasheet.ciiva.com/2458/pyu-r-int-thick-7-2458768.pdf?src-supplier=Digi-Key; ComponentLink1Description: https://datasheet.ciiva.com/2458/pyu-r-int-thick-7-2458768.pdf?src-supplier=Digi-Key; ComponentLink2URL: https://datasheet.ciiva.com/2458/pyu-r-int-thick-7-2458769.pdf?src-supplier=Digi-Key; ComponentLink2Description: https://datasheet.ciiva.com/2458/pyu-r-int-thick-7-2458769.pdf?src-supplier=Digi-Key; ComponentLink3URL: https://datasheet.ciiva.com/2458/pyu-r-int-thick-7-2458767.pdf?src-supplier=Digi-Key; ComponentLink3Description: https://datasheet.ciiva.com/2458/pyu-r-int-thick-7-2458767.pdf?src-supplier=Digi-Key; Mount: SMT; Type: Резистор
footprint RESC310X160X65L40N (Resistor, Chip; 3.10 mm L X 1.60 mm W X 0.65 mm H body)
pins: 1, 2

## RC1206JR-078K2L
designator R?  (value not drawn)
Chip Resistor Surface Mount 1206 8,2 кОм; Manufacturer 1: Yageo; Resistance: 8.2kR; Tolerance: 5%; Temperature Coefficient: 100ppm/°C; Power Rating: 250mW; Voltage Rating: 200V; Value: 8k2; Supplier 1: Digi-Key; Supplier Part Number 1: 311-8.2KERCT-ND; Manufacturer Part Number 1: RC1206JR-078K2L; RoHS: Yes; Category: Chip SMD Resistors; Stock 1: 10000; Pricing 1: 1=0,10000, 10=0,06300, 100=0,02580, 1000=0,01158, 2500=0,01005 (USD); Case/Package: 1206; Contact Plating: Tin,Matte; Case Code (Imperial): 1206; Case Code (Metric): 3216; Size Code: 1206; Min Operating Temperature: -55°C; Max Operating Temperature: 155°C; Resistor Type: Thick Film; Packaging: Tape and Reel; Package Quantity: 1; Termination: SMD/SMT; Number of Terminations: 2; Max Power Dissipation: 250mW; Features: Moisture Resistant; Series: RC; Resistance Tolerance: 5%; Length: 0.122inch; Width: 0.063inch; Height: 0.026inch; Radiation Hardening: No; REACH SVHC: Unknown; Lead Free: Lead Free; RoHS Compliant: Yes; ComponentLink1URL: https://datasheet.ciiva.com/2458/pyu-r-int-thick-7-2458812.pdf?src-supplier=Digi-Key; ComponentLink1Description: https://datasheet.ciiva.com/2458/pyu-r-int-thick-7-2458812.pdf?src-supplier=Digi-Key; ComponentLink2URL: https://datasheet.ciiva.com/2458/pyu-r-int-thick-7-2458813.pdf?src-supplier=Digi-Key; ComponentLink2Description: https://datasheet.ciiva.com/2458/pyu-r-int-thick-7-2458813.pdf?src-supplier=Digi-Key; ComponentLink3URL: https://datasheet.ciiva.com/2458/pyu-r-int-thick-7-2458814.pdf?src-supplier=Digi-Key; ComponentLink3Description: https://datasheet.ciiva.com/2458/pyu-r-int-thick-7-2458814.pdf?src-supplier=Digi-Key; ComponentLink4URL: https://datasheet.ciiva.com/16746/pyu-rc1206-51-rohs-l-4-16746158.pdf?src-supplier=Future+Electronics; ComponentLink4Description: https://datasheet.ciiva.com/16746/pyu-rc1206-51-rohs-l-4-16746158.pdf?src-supplier=Future+Electronics; Mount: SMT; Type: Резистор
footprint RESC310X160X65L40N (Resistor, Chip; 3.10 mm L X 1.60 mm W X 0.65 mm H body)
pins: 1, 2

## RC1206JR-0710KL
designator R?  (value not drawn)
Chip Resistor Surface Mount 1206 10 кОм; Manufacturer 1: Yageo; Tolerance: 5%; Resistance: 10kR; Temperature Coefficient: 100ppm/°C; Power Rating: 250mW; Voltage Rating: 200V; Value: 10k; Supplier 1: Digi-Key; Supplier Part Number 1: 311-10KERCT-ND; Manufacturer Part Number 1: RC1206JR-0710KL; RoHS: Yes; Category: Chip SMD Resistors; Stock 1: 1921623; Pricing 1: 1=0,10000, 10=0,06300, 100=0,02580, 1000=0,01158, 2500=0,01005 (USD); Case/Package: 1206; Case Code (Imperial): 1206; Case Code (Metric): 3216; Min Operating Temperature: -55°C; Max Operating Temperature: 155°C; Resistor Type: Thick Film; Packaging: Tape and Reel; Package Quantity: 5000; Termination: SMD/SMT; Number of Terminations: 2; Max Power Dissipation: 250mW; Working Voltage: 200V; Series: RC1206; Resistance Tolerance: 5%; Construction: Rectangular; Length: 0.122inch; Width: 0.063inch; Height: 0.026inch; Depth: 1.6mm; REACH SVHC: Unknown; Lead Free: Lead Free; Military Standard: Not; RoHS Compliant: Yes; ComponentLink1URL: https://datasheet.ciiva.com/29154/402664-da-01-en-smd-widerstand-chip1206-10-kohm-29154546.pdf?src-supplier=Conrad; ComponentLink1Description: https://datasheet.ciiva.com/29154/402664-da-01-en-smd-widerstand-chip1206-10-kohm-29154546.pdf?src-supplier=Conrad; ComponentLink2URL: https://datasheet.ciiva.com/7983/444357-7983813.pdf?src-supplier=Element14; ComponentLink2Description: https://datasheet.ciiva.com/7983/444357-7983813.pdf?src-supplier=Element14; ComponentLink3URL: https://datasheet.ciiva.com/2458/pyu-rc1206-51-rohs-l-4-2458635.pdf?src-supplier=Digi-Key; ComponentLink3Description: https://datasheet.ciiva.com/2458/pyu-rc1206-51-rohs-l-4-2458635.pdf?src-supplier=Digi-Key; ComponentLink4URL: https://datasheet.ciiva.com/2458/pyu-rc1206-51-rohs-l-4-2458636.pdf?src-supplier=Digi-Key; ComponentLink4Description: https://datasheet.ciiva.com/2458/pyu-rc1206-51-rohs-l-4-2458636.pdf?src-supplier=Digi-Key; ComponentLink5URL: https://datasheet.ciiva.com/2458/pyu-rc1206-51-rohs-l-4-2458637.pdf?src-supplier=Digi-Key; ComponentLink5Description: https://datasheet.ciiva.com/2458/pyu-rc1206-51-rohs-l-4-2458637.pdf?src-supplier=Digi-Key; Mount: SMT; Type: Резистор
footprint RESC310X160X65L40N (Resistor, Chip; 3.10 mm L X 1.60 mm W X 0.65 mm H body)
pins: 1, 2

## RC1206JR-0710RL
designator R?  (value not drawn)
Chip Resistor Surface Mount 1206 10 Ом; Manufacturer 1: Yageo; Manufacturer Part Number 1: RC1206JR-0722RL; Tolerance: 5%; Resistance: 22R; Temperature Coefficient: 100ppm/°C; Power Rating: 250mW; Voltage Rating: 200V; Value: 10; RoHS: Yes; Category: Chip SMD Resistors; Stock 1: 377093; Pricing 1: 1=0,10000, 10=0,06300, 100=0,02580, 1000=0,01158, 2500=0,01005 (USD); Case/Package: 1206; Contact Plating: Tin,Matte; Case Code (Imperial): 1206; Case Code (Metric): 3216; Min Operating Temperature: -55°C; Max Operating Temperature: 155°C; Resistor Type: Thick Film; Package Quantity: 1; Packaging: Tape and Reel; Termination: SMD/SMT; Number of Terminations: 2; Max Power Dissipation: 250mW; Voltage Rating (DC): 200V; Features: Moisture Resistant; Series: RC; Construction: Rectangular; Length: 3.1mm; Width: 1.6mm; Height: 0.026inch; Depth: 1.6mm; Radiation Hardening: No; Military Standard: Not; Lead Free: Lead Free; RoHS Compliant: Yes; Working Voltage: 200V; Resistance Tolerance: 5%; Technology: THICK FILM; REACH SVHC: Unknown; ComponentLink1URL: https://datasheet.ciiva.com/29181/402346-da-01-en-smd-widerstand-chip1206-22-ohm-29181583.pdf?src-supplier=Conrad; ComponentLink1Description: https://datasheet.ciiva.com/29181/402346-da-01-en-smd-widerstand-chip1206-22-ohm-29181583.pdf?src-supplier=Conrad; ComponentLink2URL: https://datasheet.ciiva.com/16741/pyu-rc1206-51-rohs-l-4-16741109.pdf?src-supplier=Future+Electronics; ComponentLink2Description: https://datasheet.ciiva.com/16741/pyu-rc1206-51-rohs-l-4-16741109.pdf?src-supplier=Future+Electronics; ComponentLink3URL: https://datasheet.ciiva.com/7857/444357-7857469.pdf?src-supplier=Element14; ComponentLink3Description: https://datasheet.ciiva.com/7857/444357-7857469.pdf?src-supplier=Element14; ComponentLink4URL: https://datasheet.ciiva.com/7857/444357-7857470.pdf?src-supplier=Element14; ComponentLink4Description: https://datasheet.ciiva.com/7857/444357-7857470.pdf?src-supplier=Element14; Supplier 1: Digi-Key; Supplier Part Number 1: 311-10ERCT-ND; Mount: SMT; Type: Резистор
footprint RESC310X160X65L40N (Resistor, Chip; 3.10 mm L X 1.60 mm W X 0.65 mm H body)
pins: 1, 2

## RC1206JR-0712RL
designator R?  (value not drawn)
Chip Resistor Surface Mount 1206 12 Ом; Tolerance: 5%; Resistance: 680R; Temperature Coefficient: 100ppm/°C; Power Rating: 250mW; Voltage Rating: 200V; Value: 12; Manufacturer 2: Yageo; Manufacturer Part Number 2: RC1206JR-07680RL; RoHS: Yes; Category: Chip SMD Resistors; Stock 2: 45000; Pricing 2: 1=0,01400, 5000=0,01400 (USD); Case/Package: 1206; Case Code (Metric): 3216; Case Code (Imperial): 1206; Size Code: 1206; Min Operating Temperature: -55°C; Max Operating Temperature: 155°C; Resistor Type: Thick Film; Packaging: Tape and Reel; Package Quantity: 1; Number of Terminations: 2; Termination: SMD/SMT; Max Power Dissipation: 250mW; Features: Moisture Resistant; Series: RC; Construction: Rectangular; Resistance Tolerance: 5%; Length: 0.122inch; Width: 0.063inch; Height: 0.026inch; Depth: 1.6mm; REACH SVHC: Unknown; Lead Free: Lead Free; Military Standard: Not; RoHS Compliant: Yes; ComponentLink1URL: https://datasheet.ciiva.com/29181/402524-da-01-en-smd-widerstand-chip1206-680-ohm-29181458.pdf?src-supplier=Conrad; ComponentLink1Description: https://datasheet.ciiva.com/29181/402524-da-01-en-smd-widerstand-chip1206-680-ohm-29181458.pdf?src-supplier=Conrad; ComponentLink2URL: https://datasheet.ciiva.com/7857/444357-7857525.pdf?src-supplier=Element14; ComponentLink2Description: https://datasheet.ciiva.com/7857/444357-7857525.pdf?src-supplier=Element14; ComponentLink3URL: https://datasheet.ciiva.com/7857/444357-7857526.pdf?src-supplier=Element14; ComponentLink3Description: https://datasheet.ciiva.com/7857/444357-7857526.pdf?src-supplier=Element14; ComponentLink4URL: https://datasheet.ciiva.com/17045/pyu-rc1206-51-rohs-l-4-17045767.pdf?src-supplier=Future+Electronics; ComponentLink4Description: https://datasheet.ciiva.com/17045/pyu-rc1206-51-rohs-l-4-17045767.pdf?src-supplier=Future+Electronics; ComponentLink5URL: https://datasheet.ciiva.com/2458/pyu-r-int-thick-7-2458809.pdf?src-supplier=Digi-Key; ComponentLink5Description: https://datasheet.ciiva.com/2458/pyu-r-int-thick-7-2458809.pdf?src-supplier=Digi-Key; ComponentLink6URL: https://datasheet.ciiva.com/2458/pyu-r-int-thick-7-2458810.pdf?src-supplier=Digi-Key; ComponentLink6Description: https://datasheet.ciiva.com/2458/pyu-r-int-thick-7-2458810.pdf?src-supplier=Digi-Key; ComponentLink7URL: https://datasheet.ciiva.com/2458/pyu-r-int-thick-7-2458811.pdf?src-supplier=Digi-Key; ComponentLink7Description: https://datasheet.ciiva.com/2458/pyu-r-int-thick-7-2458811.pdf?src-supplier=Digi-Key; Manufacturer 3: Yageo; Manufacturer Part Number 3: RC1206JR-0712RL; Stock 3: 191876; Pricing 3: 1=0,10000, 10=0,06300, 100=0,02580, 1000=0,01158, 2500=0,01005 (USD); Number of Pins: 2; Contact Plating: Tin,Matte; Voltage Rating (DC): 200V; Working Voltage: 200V; Technology: THICK FILM; Radiation Hardening: No; ComponentLink8URL: https://datasheet.ciiva.com/2520/pyu-r-int-thick-7-2520624.pdf?src-supplier=Digi-Key; ComponentLink8Description: https://datasheet.ciiva.com/2520/pyu-r-int-thick-7-2520624.pdf?src-supplier=Digi-Key; ComponentLink9URL: https://datasheet.ciiva.com/2520/pyu-r-int-thick-7-2520625.pdf?src-supplier=Digi-Key; ComponentLink9Description: https://datasheet.ciiva.com/2520/pyu-r-int-thick-7-2520625.pdf?src-supplier=Digi-Key; ComponentLink10URL: https://datasheet.ciiva.com/7857/444357-7857438.pdf?src-supplier=Element14; ComponentLink10Description: https://datasheet.ciiva.com/7857/444357-7857438.pdf?src-supplier=Element14; ComponentLink11URL: https://datasheet.ciiva.com/2520/pyu-r-int-thick-7-2520623.pdf?src-supplier=Digi-Key; ComponentLink11Description: https://datasheet.ciiva.com/2520/pyu-r-int-thick-7-2520623.pdf?src-supplier=Digi-Key; Supplier 1: Digi-Key; Mount: SMT; Type: Резистор
footprint RESC310X160X65L40N (Resistor, Chip; 3.10 mm L X 1.60 mm W X 0.65 mm H body)
pins: 1, 2

## RC1206JR-0718RL
designator R?  (value not drawn)
Chip Resistor Surface Mount 1206 10 Ом; Manufacturer 1: Yageo; Resistance: 18R; Tolerance: 5%; Temperature Coefficient: 100ppm/°C; Power Rating: 250mW; Voltage Rating: 200V; Value: 18; ComponentLink1URL: https://datasheet.ciiva.com/29181/402346-da-01-en-smd-widerstand-chip1206-22-ohm-29181583.pdf?src-supplier=Conrad; ComponentLink1Description: https://datasheet.ciiva.com/29181/402346-da-01-en-smd-widerstand-chip1206-22-ohm-29181583.pdf?src-supplier=Conrad; ComponentLink2URL: https://datasheet.ciiva.com/16741/pyu-rc1206-51-rohs-l-4-16741109.pdf?src-supplier=Future+Electronics; ComponentLink2Description: https://datasheet.ciiva.com/16741/pyu-rc1206-51-rohs-l-4-16741109.pdf?src-supplier=Future+Electronics; ComponentLink3URL: https://datasheet.ciiva.com/7857/444357-7857469.pdf?src-supplier=Element14; ComponentLink3Description: https://datasheet.ciiva.com/7857/444357-7857469.pdf?src-supplier=Element14; ComponentLink4URL: https://datasheet.ciiva.com/7857/444357-7857470.pdf?src-supplier=Element14; ComponentLink4Description: https://datasheet.ciiva.com/7857/444357-7857470.pdf?src-supplier=Element14; Supplier 1: Digi-Key; Supplier Part Number 1: 311-18ERCT-ND; Manufacturer Part Number 1: RC1206JR-0718RL; RoHS: Yes; Category: Chip SMD Resistors; Stock 1: 4340; Pricing 1: 1=0,10000, 10=0,06300, 100=0,02580, 1000=0,01158, 2500=0,01005 (USD); Case/Package: 1206; Number of Pins: 2; Contact Plating: Tin,Matte; Case Code (Metric): 3216; Case Code (Imperial): 1206; Size Code: 1206; Min Operating Temperature: -55°C; Max Operating Temperature: 155°C; Resistor Type: Thick Film; Voltage Rating (DC): 200V; Package Quantity: 1; Packaging: Tape and Reel; Number of Terminations: 2; Termination: SMD/SMT; Max Power Dissipation: 250mW; Features: Moisture Resistant; Series: RC; Resistance Tolerance: 5%; Construction: Rectangular; Length: 0.122inch; Width: 0.063inch; Height: 0.026inch; Depth: 1.6mm; Radiation Hardening: No; REACH SVHC: Unknown; Military Standard: Not; Lead Free: Lead Free; RoHS Compliant: Yes; ComponentLink5URL: https://datasheet.ciiva.com/29181/402338-da-01-en-smd-widerstand-chip1206-18-ohm-29181579.pdf?src-supplier=Conrad; ComponentLink5Description: https://datasheet.ciiva.com/29181/402338-da-01-en-smd-widerstand-chip1206-18-ohm-29181579.pdf?src-supplier=Conrad; ComponentLink6URL: https://datasheet.ciiva.com/2458/pyu-r-int-thick-7-2458996.pdf?src-supplier=Digi-Key; ComponentLink6Description: https://datasheet.ciiva.com/2458/pyu-r-int-thick-7-2458996.pdf?src-supplier=Digi-Key; ComponentLink7URL: https://datasheet.ciiva.com/2458/pyu-r-int-thick-7-2458997.pdf?src-supplier=Digi-Key; ComponentLink7Description: https://datasheet.ciiva.com/2458/pyu-r-int-thick-7-2458997.pdf?src-supplier=Digi-Key; ComponentLink8URL: https://datasheet.ciiva.com/7857/444357-7857451.pdf?src-supplier=Element14; ComponentLink8Description: https://datasheet.ciiva.com/7857/444357-7857451.pdf?src-supplier=Element14; ComponentLink9URL: https://datasheet.ciiva.com/16745/pyu-rc1206-51-rohs-l-4-16745947.pdf?src-supplier=Future+Electronics; ComponentLink9Description: https://datasheet.ciiva.com/16745/pyu-rc1206-51-rohs-l-4-16745947.pdf?src-supplier=Future+Electronics; ComponentLink10URL: https://datasheet.ciiva.com/2458/pyu-r-int-thick-7-2458995.pdf?src-supplier=Digi-Key; ComponentLink10Description: https://datasheet.ciiva.com/2458/pyu-r-int-thick-7-2458995.pdf?src-supplier=Digi-Key; ComponentLink11URL: https://datasheet.ciiva.com/7857/444357-7857452.pdf?src-supplier=Element14; ComponentLink11Description: https://datasheet.ciiva.com/7857/444357-7857452.pdf?src-supplier=Element14; Mount: SMT; Type: Резистор
footprint RESC310X160X65L40N (Resistor, Chip; 3.10 mm L X 1.60 mm W X 0.65 mm H body)
pins: 1, 2